# Altium schematic symbol library 74LVC1G157GV-Q100H.SchLib: 1 symbol
Pins are listed as number, name and electrical type; pins without a type are passive.

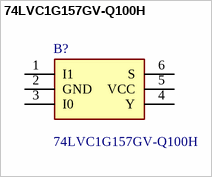
[diagram p0: symbol 74LVC1G157GV-Q100H]

## 74LVC1G157GV-Q100H
designator B?
NXP - 74LVC1G157GV-Q100H - MUX, SINGLE, 2 I/P, SC-74-6; Manufacturer_Name: Nexperia; Geometry.Height: 1.1mm; Manufacturer_Part_Number: 74LVC1G157GV-Q100H; Mouser Part Number: 771-74LVC1G157GVQ100; Mouser Price/Stock: https://www.mouser.co.uk/ProductDetail/Nexperia/74LVC1G157GV-Q100H?qs=5XOdhvmYM0Nhlh6GR9ENlQ%3D%3D; Arrow Part Number: 74LVC1G157GV-Q100H; Arrow Price/Stock: https://www.arrow.com/en/products/74lvc1g157gv-q100h/nexperia?utm_currency=USD&region=nac; Datasheet Link: https://assets.nexperia.com/documents/data-sheet/74LVC1G157_Q100.pdf
footprint SOT95P275X110-6N
pins: 1 I1, 2 GND, 3 I0, 4 Y, 5 VCC, 6 S